# Altium schematic symbol library My_library.SchLib: 1 symbol
Pins are listed as number, name and electrical type; pins without a type are passive.

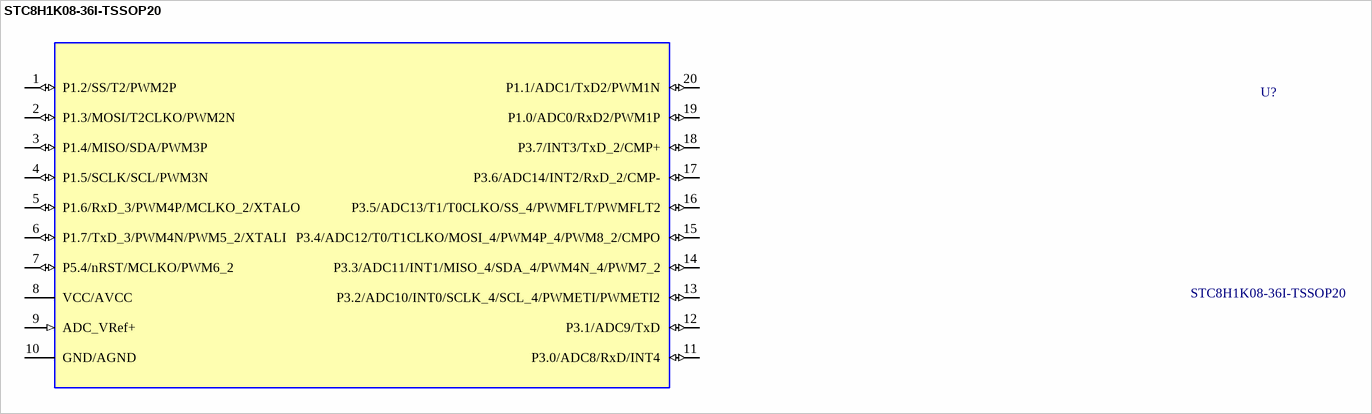
[diagram p0: symbol STC8H1K08-36I-TSSOP20]

## STC8H1K08-36I-TSSOP20
designator U?
Manufacturer: STC Micro; Value: STC8H1K08-36I-TSSOP20; MPN: STC8H1K08-36I-TSSOP20; LCSC Part #: C915673; Manufacturer Part Number: STC8H1K08-36I-TSSOP20
footprint TSSOP-20_4.4x6.5mm_P0.65mm
pins: 1 P1.2/SS/T2/PWM2P (io), 2 P1.3/MOSI/T2CLKO/PWM2N (io), 3 P1.4/MISO/SDA/PWM3P (io), 4 P1.5/SCLK/SCL/PWM3N (io), 5 P1.6/RxD_3/PWM4P/MCLKO_2/XTALO (io), 6 P1.7/TxD_3/PWM4N/PWM5_2/XTALI (io), 7 P5.4/nRST/MCLKO/PWM6_2 (io), 8 VCC/AVCC (power), 9 ADC_VRef+ (in), 10 GND/AGND (power), 11 P3.0/ADC8/RxD/INT4 (io), 12 P3.1/ADC9/TxD (io), 13 P3.2/ADC10/INT0/SCLK_4/SCL_4/PWMETI/PWMETI2 (io), 14 P3.3/ADC11/INT1/MISO_4/SDA_4/PWM4N_4/PWM7_2 (io), 15 P3.4/ADC12/T0/T1CLKO/MOSI_4/PWM4P_4/PWM8_2/CMPO (io), 16 P3.5/ADC13/T1/T0CLKO/SS_4/PWMFLT/PWMFLT2 (io), 17 P3.6/ADC14/INT2/RxD_2/CMP- (io), 18 P3.7/INT3/TxD_2/CMP+ (io), 19 P1.0/ADC0/RxD2/PWM1P (io), 20 P1.1/ADC1/TxD2/PWM1N (io)